# Altium schematic symbol library AOD413A.SchLib: 1 symbol
Pins are listed as number, name and electrical type; pins without a type are passive.

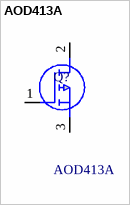
[diagram p0: symbol AOD413A]

## AOD413A
designator Q?
Trans MOSFET P-CH 40V 12A 3-Pin(2+Tab) DPAK; Manufacturer_Name: Alpha & Omega Semiconductors; Geometry.Height: 2.6mm; TME Electronic Components Part Number: *; TME Electronic Components Price/Stock: *; Manufacturer_Part_Number: AOD413A; Datasheet Link: https://www.aosmd.com/res/datasheets/AOD413A.pdf
footprint AOD413A
pins: 1 G, 2 D, 3 S